# Altium schematic symbol library MY_LIB_Resistors_IEC.SchLib: 1 symbol
Pins are listed as number, name and electrical type; pins without a type are passive.

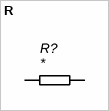
[diagram p0: symbol R]

## R
designator R?
pins: 1, 2